# Altium integrated library MMSZ5246B-7-F.IntLib: 1 symbol
Pins are listed as number, name and electrical type; pins without a type are passive.

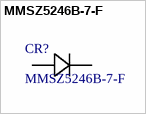
[diagram p0: symbol MMSZ5246B-7-F]

## MMSZ5246B-7-F
designator CR?
Description; Manufacturer_Name: Diodes Inc; Copyright: Copyright (C) 2025 Ultra Librarian. All rights reserved.; Manufacturer_Part_Number: MMSZ5246B-7-F
footprint SOD123_DIO
pins: 1, 2